# Altium footprint library ACB_PcbLib.PcbLib: 152 footprints (part 6 of 10)
Each footprint in its own frame and in the unit in brackets; x right, y up, seen from the top. Pads: shape width x height; smd on the part's side, far side on the other; paste and mask are expansions set on the pad; w line width, h text height; cw(c..) or ccw(c..) is an arc to the next point about the centre after c.
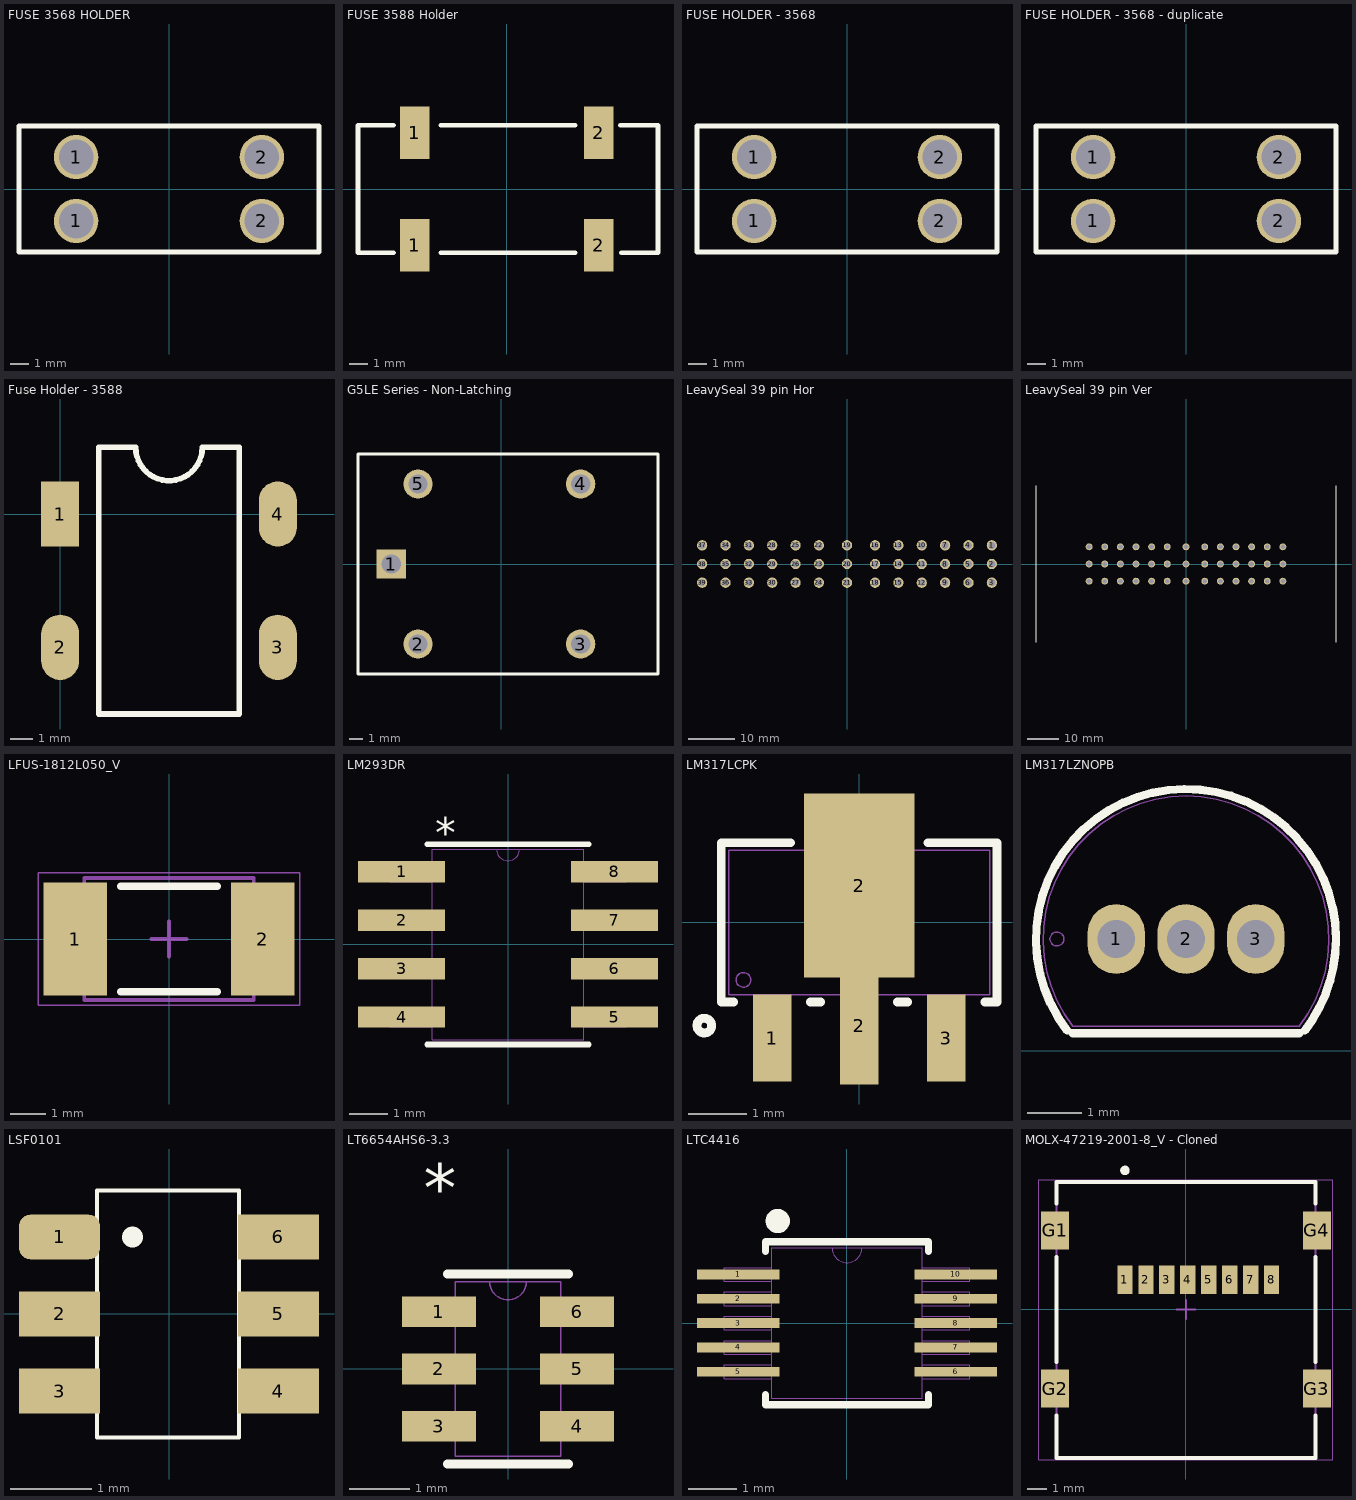
[diagram p5: the footprints below, top view; thin cyan lines are the x and y axes]

## FUSE 3568 HOLDER [mil]
pads (4):
  round 93 hole 73: 1(-195,-67) 1(-195,67) 2(195,-67) 2(195,67)
Top Overlay:
  lines w10: -315,-132.5 -315,132.5 315,132.5 315,-132.5 -315,-132.5
3D body "fuseholder3568.STEP": height 289.65, standoff -110.35, extent -316.71,-130.12 313.29,134.88

## FUSE 3588 Holder [mm]
pads (4):
  rect 1.59x2.84 smd: 1(-4.95,-3.02) 1(-4.95,3.02) 2(4.95,-3.02) 2(4.95,3.02)
Top Overlay:
  lines w0.254: -6.096,-3.429 -8.001,-3.429 -8.001,3.429 -6.096,3.429 ; -3.556,-3.429 3.683,-3.429 ; -3.556,3.429 3.683,3.429 ; 6.096,3.429 8.128,3.429 8.128,-3.429 6.159,-3.429
3D body "keystone-PN3588.STEP": height 8.08, standoff 0.03, extent -8.032,-4.325 7.97,4.311

## FUSE HOLDER - 3568 [mil]
pads (4):
  round 93 hole 73: 1(-195,-67) 1(-195,67) 2(195,-67) 2(195,67)
Top Overlay:
  lines w10: -315,-132.5 -315,132.5 315,132.5 315,-132.5 -315,-132.5

## FUSE HOLDER - 3568 - duplicate [mil]
pads (4):
  round 93 hole 73: 1(-195,-67) 1(-195,67) 2(195,-67) 2(195,67)
Top Overlay:
  lines w10: -315,-132.5 -315,132.5 315,132.5 315,-132.5 -315,-132.5
3D body "fuseholder3568.STEP": height 289.65, standoff -110.35, extent -316.71,-130.12 313.29,134.88

## Fuse Holder - 3588 [mil]
pads (4):
  rect 68x117 smd: 1(0,0)
  oval 68x117 smd: 2(0,-239) 3(390,-239) 4(390,0)
Top Overlay:
  lines w10: 69,-358.5 69,119.5 135.25,119.5 ccw(c195,119.5) 254.75,119.5 321,119.5 321,-358.5 69,-358.5

## G5LE Series - Non-Latching [mm]
pads (5):
  rect 2.2x2.2 hole 1.448: 1(-8.255,0)
  round 2.2 hole 1.448: 2(-6.255,-6) 3(5.945,-6) 4(5.945,6) 5(-6.255,6)
Top Overlay:
  lines w0.254: -10.755,-8.25 -10.755,8.25 11.745,8.25 11.745,-8.25 -10.755,-8.25
3D body: height 19, standoff 0, extent -10.755,-8.25 11.745,8.25

## LeavySeal 39 pin Hor [mm] "Levyseal 90 degree 39 pin header 5-1418363-3"
pads (39):
  round 2.2 hole 1.5: 1(31,4) 2(31,0) 3(31,-4) 4(26,4) 5(26,0) 6(26,-4) 7(21,4) 8(21,0) 9(21,-4) 10(16,4) 11(16,0) 12(16,-4) 13(11,4) 14(11,0) 15(11,-4) 16(6,4) 17(6,0) 18(6,-4) 19(0,4) 20(0,0) 21(0,-4) 22(-6,4) 23(-6,0) 24(-6,-4) 25(-11,4) 26(-11,0) 27(-11,-4) 28(-16,4) 29(-16,0) 30(-16,-4) 31(-21,4) 32(-21,0) 33(-21,-4) 34(-26,4) 35(-26,0) 36(-26,-4) 37(-31,4) 38(-31,0) 39(-31,-4)
via 45,-4 diameter 3.5 hole 3
via -45,-4 diameter 3.5 hole 3
via 51.5,-4 diameter 4 hole 3.5
via -51.5,-4 diameter 4 hole 3.5
3D body "c-5-1418363-3-c-3d.stp": height 37, standoff -11, extent -66,-47.4 66,10.4

## LeavySeal 39 pin Ver [mm] "Levyseal 90 degree 39 pin header 5-1418363-3"
pads (39):
  round 2.2 hole 1.55: 1(31,5.5) 2(31,0) 3(31,-5.5) 4(26,5.5) 5(26,0) 6(26,-5.5) 7(21,5.5) 8(21,0) 9(21,-5.5) 10(16,5.5) 11(16,0) 12(16,-5.5) 13(11,5.5) 14(11,0) 15(11,-5.5) 16(6,5.5) 17(6,0) 18(6,-5.5) 19(0,5.5) 20(0,0) 21(0,-5.5) 22(-6,5.5) 23(-6,0) 24(-6,-5.5) 25(-11,5.5) 26(-11,0) 27(-11,-5.5) 28(-16,5.5) 29(-16,0) 30(-16,-5.5) 31(-21,5.5) 32(-21,0) 33(-21,-5.5) 34(-26,5.5) 35(-26,0) 36(-26,-5.5) 37(-31,5.5) 38(-31,0) 39(-31,-5.5)
Top Overlay:
  lines w0.254: -48,-25 -48,25 ; 48,-25 48,25
3D body "c-5-1418363-1-c-3d.stp": height 9.5, standoff -37.5, extent -66,-24 66,24

## LFUS-1812L050_V [mm] "Chip Fuse, 2-Leads, Body 4.73x3.41mm"
height 0.75
pads (2):
  rect 1.78x3.15 smd: 1(-2.615,0) 2(2.615,0)
Top Overlay:
  lines w0.2: -1.35,-1.475 1.35,-1.475 ; -1.35,1.475 1.35,1.475
Mechanical 13:
  lines w0.1: -2.365,-1.705 -2.365,1.705 2.365,1.705 2.365,-1.705 -2.365,-1.705
Mechanical 15:
  lines w0.05: -3.65,-1.85 -3.65,1.85 3.65,1.85 3.65,-1.85 -3.65,-1.85
  lines w0.1: -0.5,0 0.5,0 ; 0,-0.5 0,0.5
3D body: height 0.75, standoff 0, extent -2.364,-1.704 2.364,1.704

## LM293DR [mil] "IC Dual Comparator 8SOIC"
pads (8):
  rect 90x22 smd: 1(-110,75) 2(-110,25) 3(-110,-25) 4(-110,-75) 5(110,-75) 6(110,-25) 7(110,25) 8(110,75)
Top Overlay:
  lines w6: -83.5,-103.5 83.5,-103.5 ; -83.5,103.5 83.5,103.5
  text "*" at -75,100 h31.25
Mechanical 1:
  lines w1: -12,98.5 ccw(c0,98.5) 12,98.5 ; -122,-85 -122,-65 -78.5,-65 -78.5,-85 -122,-85 ; -122,-35 -122,-15 -78.5,-15 -78.5,-35 -122,-35 ; -122,15 -122,35 -78.5,35 -78.5,15 -122,15 ; -122,65 -122,85 -78.5,85 -78.5,65 -122,65 ; -78.5,-98.5 78.5,-98.5 78.5,98.5 -78.5,98.5 -78.5,-98.5 ; 78.5,-85 78.5,-65 122,-65 122,-85 78.5,-85 ; 78.5,-35 78.5,-15 122,-15 122,-35 78.5,-35 ; 78.5,15 78.5,35 122,35 122,15 78.5,15 ; 78.5,65 78.5,85 122,85 122,65 78.5,65
3D body "D8-M.step": height 69.09, standoff 0, extent -122,-98.49 122.01,98.51

## LM317LCPK [mil]
pads (4):
  rect 26x59 smd: 1(-59.06,-78.5) 3(59.06,-78.5)
  rect 26x80 smd: 2(0,-70)
  rect 75x125 smd: 2(0,25)
Top Overlay:
  circle w6: c-105,-70 r5
  lines w6: -85.16,-54 -93.5,-54 -93.5,54 -46.6,54 ; -32.96,-54 -26.1,-54 ; 26.1,-54 32.96,-54 ; 46.6,54 93.5,54 93.5,-54 85.16,-54
Mechanical 1:
  circle w1: c-78.5,-39 r5
  lines w1: -88.5,-49 -88.5,49 88.5,49 88.5,-49 -88.5,-49 ; -70.06,-96 -48.06,-96 -48.06,-49 -70.06,-49 -70.06,-96 ; -11,-96 11,-96 11,-49 -11,-49 -11,-96 ; 48.06,-96 70.06,-96 70.06,-49 48.06,-49 48.06,-96
3D body "PK3-L.step": height 65.12, standoff 0, extent -87,-93.48 90,73.48

## LM317LZNOPB [mil]
pads (3):
  oval 41x50 hole 27 mask-1000: 1(135,80) 2(185,80) 3(235,80)
Top Overlay:
  lines w6: 99.8,14.45 cw(c185,80) 292.5,80 cw(c185,80) 270.2,14.45 ; 103.76,12.5 266.24,12.5
Top Paste:
  region: 214.1,75.5 215.69,67.5 220.22,60.72 227,56.19 235,54.6 243,56.19 249.78,60.72 254.31,67.5 255.9,75.5 255.9,84.5 254.31,92.5 249.78,99.28 243,103.81 235,105.4 227,103.81 220.22,99.28 215.69,92.5 214.1,84.5
  region: 164.1,75.5 165.69,67.5 170.22,60.72 177,56.19 185,54.6 193,56.19 199.78,60.72 204.31,67.5 205.9,75.5 205.9,84.5 204.31,92.5 199.78,99.28 193,103.81 185,105.4 177,103.81 170.22,99.28 165.69,92.5 164.1,84.5
  region: 114.5,55 155.5,55 155.5,105 114.5,105
Top Solder:
  region: 214.1,75.5 215.69,67.5 220.22,60.72 227,56.19 235,54.6 243,56.19 249.78,60.72 254.31,67.5 255.9,75.5 255.9,84.5 254.31,92.5 249.78,99.28 243,103.81 235,105.4 227,103.81 220.22,99.28 215.69,92.5 214.1,84.5
  region: 164.1,75.5 165.69,67.5 170.22,60.72 177,56.19 185,54.6 193,56.19 199.78,60.72 204.31,67.5 205.9,75.5 205.9,84.5 204.31,92.5 199.78,99.28 193,103.81 185,105.4 177,103.81 170.22,99.28 165.69,92.5 164.1,84.5
  region: 114.5,55 155.5,55 155.5,105 114.5,105
Bottom Solder:
  region: 214.1,75.5 215.69,67.5 220.22,60.72 227,56.19 235,54.6 243,56.19 249.78,60.72 254.31,67.5 255.9,75.5 255.9,84.5 254.31,92.5 249.78,99.28 243,103.81 235,105.4 227,103.81 220.22,99.28 215.69,92.5 214.1,84.5
  region: 164.1,75.5 165.69,67.5 170.22,60.72 177,56.19 185,54.6 193,56.19 199.78,60.72 204.31,67.5 205.9,75.5 205.9,84.5 204.31,92.5 199.78,99.28 193,103.81 185,105.4 177,103.81 170.22,99.28 165.69,92.5 164.1,84.5
  region: 114.5,55 155.5,55 155.5,105 114.5,105
Mechanical 1:
  circle w1: c92.5,80 r5
  lines w1: 103.76,17.5 cw(c185,80) 266.24,17.5 103.76,17.5
  lines w6: 125,80 145,80 ; 135,70 135,90
3D body "Z03A.stp": height 282.48, standoff -22.52, extent 81.34,16.22 286.38,181.26

## LSF0101 [mm]
pads (6):
  rrect50% 1x0.55 smd mask+0.07: 1(-1.35,0.95)
  rect 1x0.55 smd mask+0.07: 2(-1.35,0) 3(-1.35,-0.95) 4(1.35,-0.95) 5(1.35,0) 6(1.35,0.95)
Top Overlay:
  lines w0.05: -0.887,-1.525 -0.45,-1.525 0.425,-1.525 0.862,-1.525 0.862,1.525 0.425,1.525 -0.45,1.525 -0.887,1.525 -0.887,0.925 -0.887,-1.525
  lines w0.254: -0.45,0.948 ccw(c-0.5,0.955) -0.45,0.95

## LT6654AHS6-3.3 [mil]
pads (6):
  rect 48x20 smd: 1(-45,37.4) 2(-45,0) 3(-45,-37.4) 4(45,-37.4) 5(45,0) 6(45,37.4)
Top Overlay:
  lines w6: -39.5,-62 39.5,-62 ; -39.5,62 39.5,62
  text "*" at -55,102.4 h31.25
Mechanical 1:
  lines w1: -12,57 ccw(c0,57) 12,57 ; -55,-46.4 -55,-28.4 -34.5,-28.4 -34.5,-46.4 -55,-46.4 ; -55,-9 -55,9 -34.5,9 -34.5,-9 -55,-9 ; -55,28.4 -55,46.4 -34.5,46.4 -34.5,28.4 -55,28.4 ; -34.5,-57 34.5,-57 34.5,57 -34.5,57 -34.5,-57 ; 34.5,-46.4 34.5,-28.4 55,-28.4 55,-46.4 34.5,-46.4 ; 34.5,-9 34.5,9 55,9 55,-9 34.5,-9 ; 34.5,28.4 34.5,46.4 55,46.4 55,28.4 34.5,28.4
  text "*" at -19.5,54 h31.25

## LTC4416 [mil]
pads (10):
  rect 67x7.87 smd: 1(-88,39.4) 2(-88,19.7) 3(-88,0) 4(-88,-19.7) 5(-88,-39.4) 7(88,-19.7) 8(88,0) 9(88,19.7) 10(88,39.4)
  rect 67.01x7.87 smd: 6(88,-39.4)
Top Overlay:
  circle w9.84: c-56.1,82.68 r4.92
  lines w6: -66,-58 -66,-66 66,-66 66,-58 ; -66,58 -66,66 66,66 66,58
Mechanical 1:
  lines w1: -12,61 ccw(c0,61) 12,61 ; -99.5,-44.9 -61,-44.9 -61,-33.9 -99.5,-33.9 -99.5,-44.9 ; -99.5,-25.2 -61,-25.2 -61,-14.2 -99.5,-14.2 -99.5,-25.2 ; -99.5,-5.5 -61,-5.5 -61,5.5 -99.5,5.5 -99.5,-5.5 ; -99.5,14.2 -61,14.2 -61,25.2 -99.5,25.2 -99.5,14.2 ; -99.5,33.9 -61,33.9 -61,44.9 -99.5,44.9 -99.5,33.9 ; -61,-61 -61,61 61,61 61,-61 -61,-61 ; 61,-44.9 99.5,-44.9 99.5,-33.9 61,-33.9 61,-44.9 ; 61,-25.2 99.5,-25.2 99.5,-14.2 61,-14.2 61,-25.2 ; 61,-5.5 99.5,-5.5 99.5,5.5 61,5.5 61,-5.5 ; 61,14.2 99.5,14.2 99.5,25.2 61,25.2 61,14.2 ; 61,33.9 99.5,33.9 99.5,44.9 61,44.9 61,33.9
3D body "MSOP-10_MS-M.step": height 43.11, standoff 0, extent -99.48,-60.99 99.49,60.99

## MOLX-47219-2001-8_V - Cloned [mm] "CONN, 8-Leads, Body 14.5x13.6mm, Pitch 1.1mm"
height 1.9
pads (12):
  rect 0.8x1.5 smd: 1(-3.205,1.55) 2(-2.105,1.55) 3(-1.005,1.55) 4(0.095,1.55) 5(1.195,1.55) 6(2.295,1.55) 7(3.395,1.55) 8(4.495,1.55)
  rect 1.45x2 smd: G1(-6.875,4.15) G2(-6.875,-4.15) G3(6.875,-4.15) G4(6.875,4.15)
Top Overlay:
  circle w0.25: c-3.205,7.3 r0.125
  lines w0.2: -6.8,-5.55 -6.8,-7.8 6.8,-7.8 6.8,-5.55 ; -6.8,-2.75 -6.8,2.75 ; -6.8,5.55 -6.8,6.7 6.8,6.7 6.8,5.55 ; 6.8,-2.75 6.8,2.75
Mechanical 13:
  lines w0.1: -6.8,-7.8 -6.8,6.7 6.8,6.7 6.8,-7.8 -6.8,-7.8
Mechanical 15:
  lines w0.05: -7.725,-7.9 -7.725,6.8 7.7,6.8 7.7,-7.9 -7.725,-7.9
  lines w0.1: -0.5,0 0.5,0 ; 0,-0.5 0,0.5
3D body "472192001.stp": height 1.91, standoff 0.02, extent -7.3,-7.793 7.3,6.707